# Altium schematic symbol library Transistor.SchLib: 61 symbols (part 1 of 2)
Pins are listed as number, name and electrical type; pins without a type are passive.

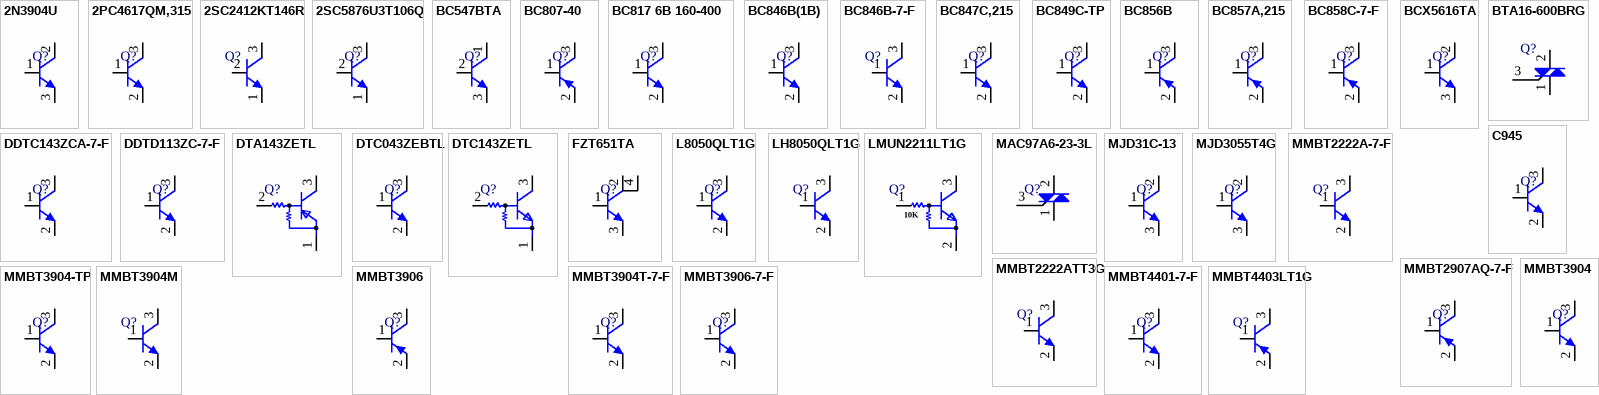
[diagram p0: symbols 2N3904U to MMBT4403LT1G]

## 2N3904U
designator Q?
40V 500mW 100@10mA,1V 200mA NPN SOT-89-3 Bipolar Transistors - BJT ROHS; Manufacturer: CBI; Manufacturer Part Number: 2N3904U; Package: SOT-89-3; LCSC Part Number: C2928256; Item Type: Transistor; ComponentLink1Description: LCSC; ComponentLink1URL: https://www.lcsc.com/product-detail/Bipolar-Transistors-BJT_CBI-2N3904U_C2928256.html
footprint SOT-89-3
pins: 1 B, 2 C, 3 E

## 2PC4617QM,315
designator Q?
TRANS NPN 50V 0.1A SOT-883; Manufacturer: NXP Semiconductors; Manufacturer Part Number: 2PC4617QM,315; Item Type: Transistor; Max Power Dissipation: 250mW; Frequency: 100MHz; hFE Min: 120; Max Collector Current: 200mA; Emitter Base Voltage (VEBO): 5V; Number of Elements: 1; Power Dissipation: 430mW; Supplier: Digikey; LCSC Part Number: C554099; RoHS: Yes; Mounting Technology: Surface Mount; Case/Package: SC; Pins: 3; Min Operating Temperature: -65°C; Max Operating Temperature: 150°C; Package Quantity: 10000; Collector Emitter Voltage (VCEO): 50V; Packaging: Tape and Reel; Polarity: NPN; Collector Base Voltage (VCBO): 50V; Gain Bandwidth Product: 100MHz; Collector-emitter Voltage-Max: 50V; Radiation Hardening: No; Lead Free: Lead Free; RoHS Compliant: Yes; ComponentLink1URL: https://datasheet.ciiva.com/15216/getdatasheetpartid-435560-15216651.pdf?src-supplier=Verical; ComponentLink1Description: https://datasheet.ciiva.com/15216/getdatasheetpartid-435560-15216651.pdf?src-supplier=Verical; ComponentLink2URL: https://datasheet.ciiva.com/979/2pc4617m-series-979622.pdf?src-supplier=Digikey; ComponentLink2Description: https://datasheet.ciiva.com/979/2pc4617m-series-979622.pdf?src-supplier=Digikey
footprint SOT-883-3
pins: 1 B, 2 E, 3 C

## 2SC2412KT146R
designator Q?
TRANS NPN 50V 0.15A SOT-346; Manufacturer: Rohm; Manufacturer Part Number: 2SC2412KT146R; Max Power Dissipation: 200mW; Max Collector Current: 150mA; Collector Base Voltage (VCBO): 60V; hFE Min: 120; Transition Frequency: 180MHz; Emitter Base Voltage (VEBO): 7V; Collector Emitter Saturation Voltage: 400mV; Element Configuration: Single; Item Type: Mosfet; Supplier 1: Digi-Key; Stock 1: 44780; Pricing 1: 1=0.2, 10=0.184, 25=0.1748, 100=0.1, 500=0.06156, 1000=0.04198 (USD); Mount: Surface Mount; Case/Package: SMD/SMT; Number of Pins: 3; Contact Plating: Copper,Tin,Silver; Min Operating Temperature: -55°C; Max Operating Temperature: 150°C; Collector Emitter Voltage (VCEO): 50V; Packaging: Tape and Reel; Package Quantity: 3000; Polarity: NPN; Continuous Collector Current: 150mA; Collector Emitter Breakdown Voltage: 50V; Max Breakdown Voltage: 50V; Gain Bandwidth Product: 180MHz; Max Frequency: 180MHz; Voltage Rating (DC): 50V; Current Rating: 150mA; Length: 2.9mm; Width: 1.6mm; Height: 1.1mm; Radiation Hardening: No; REACH SVHC: No SVHC; Lead Free: Lead Free; RoHS Compliant: Yes; ComponentLink1URL: http://www.farnell.com/datasheets/1918636.pdf?src-supplier=Element14; ComponentLink1Description: http://www.farnell.com/datasheets/1918636.pdf?src-supplier=Element14; ComponentLink2URL: http://www.rohm.com/products/databook/tr/pdf/2sc2412k.pdf?src-supplier=Future+Electronics; ComponentLink2Description: http://www.rohm.com/products/databook/tr/pdf/2sc2412k.pdf?src-supplier=Future+Electronics; ComponentLink3URL: http://www.rohm.com/products/databook/tr/pdf/2sc2412k.pdf?src-supplier=Avnet+Europe; ComponentLink3Description: http://www.rohm.com/products/databook/tr/pdf/2sc2412k.pdf?src-supplier=Avnet+Europe; ComponentLink4URL: https://www.rohm.com/datasheet/2SC2412K/2sc4081u3t106r-e?src-supplier=Digi-Key; ComponentLink4Description: https://www.rohm.com/datasheet/2SC2412K/2sc4081u3t106r-e?src-supplier=Digi-Key; ComponentLink5URL: http://www.mouser.com/ds/2/348/2sc2412k-208972.pdf?src-supplier=Mouser; ComponentLink5Description: http://www.mouser.com/ds/2/348/2sc2412k-208972.pdf?src-supplier=Mouser; Supplier Part Number 1: 2SC2412KT146RCT-ND; LCSC Part Number: C111699
footprint SOT-346
pins: 1 E, 2 B, 3 C

## 2SC5876U3T106Q
designator Q?
TRANS NPN 60V 0.5A UMT3; Manufacturer: Rohm; Manufacturer Part Number: 2SC5876U3T106Q; Item Type: Transistor; Supplier: Newark; LCSC Part Number: C509800; RoHS: No; Pricing: 5=0.458, 10=0.352, 25=0.292, 50=0.245, 100=0.206, 250=0.175, 500=0.144, 1000=0.122 (USD)
footprint UMT3
pins: 1 E, 2 B, 3 C

## BC547BTA
designator Q?
TRANS NPN 45V 0.1A TO92-3; Manufacturer: ON Semiconductor / Fairchild; Manufacturer Part Number: BC547BTA; Item Type: BJTs; Supplier: Future Electronics; Supplier Part Number: 4008015; RoHS: Yes; Stock: 10000; Pricing: 2000=0.041, 8000=0.0391, 20000=0.0379, 50000=0.0368, 80000=0.0351 (USD); Lead Free: 5697LeadFree; ComponentLink1URL: https://datasheet.ciiva.com/5770/bc546-5770589.pdf?src-supplier=Farnell; ComponentLink1Description: https://datasheet.ciiva.com/5770/bc546-5770589.pdf?src-supplier=Farnell; ComponentLink2URL: https://datasheet.ciiva.com/971/bc546-971924.pdf?src-supplier=Digikey; ComponentLink2Description: https://datasheet.ciiva.com/971/bc546-971924.pdf?src-supplier=Digikey; ComponentLink3URL: https://datasheet.ciiva.com/971/bc546-971925.pdf?src-supplier=Digikey; ComponentLink3Description: https://datasheet.ciiva.com/971/bc546-971925.pdf?src-supplier=Digikey; ComponentLink4URL: https://datasheet.ciiva.com/11197/bc550-11197771.pdf?src-supplier=Avnet; ComponentLink4Description: https://datasheet.ciiva.com/11197/bc550-11197771.pdf?src-supplier=Avnet; ComponentLink5URL: https://datasheet.ciiva.com/4722/bc547-4722169.pdf?src-supplier=Mouser; ComponentLink5Description: https://datasheet.ciiva.com/4722/bc547-4722169.pdf?src-supplier=Mouser; ComponentLink6URL: https://datasheet.ciiva.com/1195/1868820-1195467.pdf?src-supplier=Element14; ComponentLink6Description: https://datasheet.ciiva.com/1195/1868820-1195467.pdf?src-supplier=Element14; ComponentLink7URL: https://datasheet.ciiva.com/1195/1868820-1195468.pdf?src-supplier=Element14; ComponentLink7Description: https://datasheet.ciiva.com/1195/1868820-1195468.pdf?src-supplier=Element14; ComponentLink8URL: https://datasheet.ciiva.com/17179/bc546-17179703.pdf?src-supplier=Future+Electronics; ComponentLink8Description: https://datasheet.ciiva.com/17179/bc546-17179703.pdf?src-supplier=Future+Electronics; LCSC Part Number: C258144
footprint TO-92-3L
pins: 1 C, 2 B, 3 E

## BC807-40
designator Q?
45V 310mW 250@100mA,1V 800mA SOT-23 Bipolar (BJT) ROHS; Manufacturer: KEXIN; Manufacturer Part Number: BC807-40; Item Type: (BJT); Package: SOT-23; LCSC Part Number: C489159; ComponentLink1Description: LCSC; ComponentLink1URL: https://www.lcsc.com/product-detail/Bipolar-BJT_KEXIN-BC807-40_C489159.html
footprint SOT-23 (TRANS NPN 40V 0.6A SOT23)
pins: 1 B, 2 E, 3 C

## BC817 6B 160-400
designator Q?
45V 300mW 100@100mA,1V 500mA NPN SOT-23 Bipolar Transistors - BJT ROHS; Manufacturer: DOWO; Manufacturer Part Number: BC817 6B 160-400; Package: SOT-23; LCSC Part Number: C371086; Item Type: Transistor; ComponentLink1Description: LCSC; ComponentLink1URL: https://www.lcsc.com/product-detail/Bipolar-Transistors-BJT_DOWO-BC817-6B-160-400_C371086.html
footprint SOT-23 (TRANS NPN 40V 0.6A SOT23)
pins: 1 B, 2 E, 3 C

## BC846B(1B)
designator Q?
65V 300mW 200@2mA,5V 100mA NPN SOT-23 Bipolar Transistors - BJT ROHS; Manufacturer: ST(Semtech); Manufacturer Part Number: BC846B(1B); Package: SOT-23; LCSC Part Number: C118727; Item Type: Transistor; ComponentLink1Description: LCSC; ComponentLink1URL: https://www.lcsc.com/product-detail/Transistors-NPN-PNP_ST-Semtech-BC846B-1B_C118727.html
footprint SOT-23 (TRANS NPN 40V 0.6A SOT23)
pins: 1 B, 2 E, 3 C

## BC846B-7-F
designator Q?
TRANS NPN 65V 0.1A SOT23-3; Manufacturer: Diodes; Manufacturer Part Number: BC846B-7-F; Item Type: Transistors; Supplier: Future Electronics; Supplier Part Number: 3888237; RoHS: Yes; Category: BJTs; Stock: 4416000; Pricing: 3000=0.0363, 12000=0.0348, 45000=0.0335, 120000=0.0325, 300000=0.0309 (USD); ComponentLink1URL: https://datasheet.ciiva.com/15139/getdatasheetpartid-139519-15139459.pdf?src-supplier=Verical; ComponentLink1Description: https://datasheet.ciiva.com/15139/getdatasheetpartid-139519-15139459.pdf?src-supplier=Verical; ComponentLink2URL: https://datasheet.ciiva.com/22711/1911717-22711685.pdf?src-supplier=Element14; ComponentLink2Description: https://datasheet.ciiva.com/22711/1911717-22711685.pdf?src-supplier=Element14; LCSC Part Number: C183643
footprint SOT-23 (TRANS NPN 40V 0.6A SOT23)
pins: 1 B, 2 E, 3 C

## BC847C,215
designator Q?
TRANS NPN 45V 0.1A TO-236AB; Manufacturer: Nexperia; Manufacturer Part Number: BC847C,215; Item Type: BJTs; Polarity: 5054Direction; Supplier: Future Electronics; LCSC Part Number: C8664; RoHS: Yes; Stock: 18000; Pricing: 3000=0.0084, 12000=0.0081, 30000=0.0079, 75000=0.0077, 120000=0.0074 (USD); Pins: 3NUMBER; Packaging: 13Packaging; RoHS Compliant: Yes; ComponentLink1URL: http://www.farnell.com/datasheets/1856333.pdf?src-supplier=Farnell; ComponentLink1Description: http://www.farnell.com/datasheets/1856333.pdf?src-supplier=Farnell; ComponentLink2URL: https://assets.nexperia.com/documents/data-sheet/BC847_SER.pdf?src-supplier=Digikey; ComponentLink2Description: https://assets.nexperia.com/documents/data-sheet/BC847_SER.pdf?src-supplier=Digikey; ComponentLink3URL: https://datasheet.octopart.com/BC847C%2C215-NXP-Semiconductors-datasheet-20734447.pdf?src-supplier=Farnell; ComponentLink3Description: https://datasheet.octopart.com/BC847C%2C215-NXP-Semiconductors-datasheet-20734447.pdf?src-supplier=Farnell; ComponentLink4URL: https://datasheet.octopart.com/BC847C%2C215-Nexperia-datasheet-164345412.pdf?src-supplier=Future+Electronics; ComponentLink4Description: https://datasheet.octopart.com/BC847C%2C215-Nexperia-datasheet-164345412.pdf?src-supplier=Future+Electronics; ComponentLink5URL: https://datasheet.octopart.com/BC847C%2C215-Nexperia-datasheet-11982477.pdf?src-supplier=Newark; ComponentLink5Description: https://datasheet.octopart.com/BC847C%2C215-Nexperia-datasheet-11982477.pdf?src-supplier=Newark; ComponentLink6URL: https://datasheet.octopart.com/BC847C%2C215-Nexperia-datasheet-5341283.pdf?src-supplier=TME; ComponentLink6Description: https://datasheet.octopart.com/BC847C%2C215-Nexperia-datasheet-5341283.pdf?src-supplier=TME
footprint SOT-23 (TRANS NPN 40V 0.6A SOT23)
pins: 1 B, 2 E, 3 C

## BC849C-TP
designator Q?
TRANS NPN 30V 0.1A SOT23; Manufacturer: MCC; Manufacturer Part Number: BC849C-TP; Frequency: 100MHz; Max Power Dissipation: 225mW; Max Collector Current: 100mA; Emitter Base Voltage (VEBO): 6V; Number of Elements: 1; Collector-emitter Voltage-Max: 500mV; Item Type: Transistor; Supplier: Arrow Electronics; Supplier Part Number: BC849C-TP; RoHS: Yes; Category: BJTs; Stock: 3000; Pricing: 3000=0.0323, 9000=0.0245, 24000=0.0235, 45000=0.0216, 99000=0.0186 (USD); Mounting Technology: Surface Mount; Case/Package: SOT-23; Pins: 3; Min Operating Temperature: -55°C; Max Operating Temperature: 150°C; Package Quantity: 1; Collector Emitter Voltage (VCEO): 30V; Packaging: Tape and Reel; Transition Frequency: 100MHz; Collector Emitter Breakdown Voltage: 30V; Max Breakdown Voltage: 30V; Polarity: NPN; Collector Base Voltage (VCBO): 30V; Power Dissipation: 225mW; Gain Bandwidth Product: 100MHz; Series: BC849; Radiation Hardening: No; Lead Free: Lead Free; RoHS Compliant: Yes; Reach SVHC Compliant: Unknown; ComponentLink1URL: https://datasheet.ciiva.com/6362/bc846a-bc849csot-23-6362344.pdf?src-supplier=Digikey; ComponentLink1Description: https://datasheet.ciiva.com/6362/bc846a-bc849csot-23-6362344.pdf?src-supplier=Digikey; ComponentLink2URL: https://datasheet.ciiva.com/6362/bc846a-bc849csot-23-6362345.pdf?src-supplier=Digikey; ComponentLink2Description: https://datasheet.ciiva.com/6362/bc846a-bc849csot-23-6362345.pdf?src-supplier=Digikey; ComponentLink3URL: https://datasheet.ciiva.com/6362/bc846a-bc849csot-23-6362342.pdf?src-supplier=Digikey; ComponentLink3Description: https://datasheet.ciiva.com/6362/bc846a-bc849csot-23-6362342.pdf?src-supplier=Digikey; ComponentLink4URL: https://datasheet.ciiva.com/15200/getdatasheetpartid-334290-15200455.pdf?src-supplier=Verical; ComponentLink4Description: https://datasheet.ciiva.com/15200/getdatasheetpartid-334290-15200455.pdf?src-supplier=Verical
footprint SOT-23 (TRANS NPN 40V 0.6A SOT23)
pins: 1 B, 2 E, 3 C

## BC856B
designator Q?
65V 200mW 220@2mA,5V 100mA PNP SOT-23 Bipolar Transistors - BJT ROHS; Manufacturer: Guangdong Hottech; Manufacturer Part Number: BC856B; Package: SOT-23; LCSC Part Number: C181144; Item Type: Transistors; ComponentLink1Description: LCSC; ComponentLink1URL: https://www.lcsc.com/product-detail/Bipolar-Transistors-BJT_Guangdong-Hottech-BC856B_C181144.html
footprint SOT-23 (TRANS NPN 40V 0.6A SOT23)
pins: 1 B, 2 E, 3 C

## BC857A,215
designator Q?
TRANS PNP 45V 0.1A TO-236AB; Manufacturer: Nexperia; Manufacturer Part Number: BC857A,215; Item Type: Mosfet; Polarity: 5055Direction; Supplier: Rs; LCSC Part Number: C201757; RoHS: Yes; Stock: 19990; Pins: 3NUMBER; RoHS Compliant: 5897YesNo; ComponentLink1URL: https://assets.nexperia.com/documents/data-sheet/BC856_BC857_BC858.pdf?src-supplier=Digikey; ComponentLink1Description: https://assets.nexperia.com/documents/data-sheet/BC856_BC857_BC858.pdf?src-supplier=Digikey; ComponentLink2URL: https://datasheet.octopart.com/BC857A%2C215-Nexperia-datasheet-8507722.pdf?src-supplier=Newark; ComponentLink2Description: https://datasheet.octopart.com/BC857A%2C215-Nexperia-datasheet-8507722.pdf?src-supplier=Newark; ComponentLink3URL: https://datasheet.octopart.com/BC857A%2C215-Nexperia-datasheet-87580908.pdf?src-supplier=LKR; ComponentLink3Description: https://datasheet.octopart.com/BC857A%2C215-Nexperia-datasheet-87580908.pdf?src-supplier=LKR
footprint SOT-23 (TRANS NPN 40V 0.6A SOT23)
pins: 1 B, 2 E, 3 C

## BC858C-7-F
designator Q?
TRANS PNP 30V 0.1A SOT23-3; Manufacturer: Diodes; Manufacturer Part Number: BC858C-7-F; Item Type: BJTs; Supplier: Future Electronics; LCSC Part Number: C526469; RoHS: Yes; Stock: 69000; Pricing: 3000=0.021, 12000=0.0201, 30000=0.0195, 75000=0.0189, 120000=0.0181 (USD); ComponentLink1URL: https://datasheet.ciiva.com/22711/1911718-22711708.pdf?src-supplier=Element14; ComponentLink1Description: https://datasheet.ciiva.com/22711/1911718-22711708.pdf?src-supplier=Element14; ComponentLink2URL: https://datasheet.ciiva.com/11206/ds11207-11206007.pdf?src-supplier=Avnet; ComponentLink2Description: https://datasheet.ciiva.com/11206/ds11207-11206007.pdf?src-supplier=Avnet
footprint SOT-23 (TRANS NPN 40V 0.6A SOT23)
pins: 1 B, 2 E, 3 C

## BCX5616TA
designator Q?
TRANS NPN 80V 1A SOT89-3; Manufacturer: Diodes; Manufacturer Part Number: BCX5616TA; Item Type: Transistor; Supplier: Future Electronics; Supplier Part Number: 8266140; RoHS: Yes; Category: BJTs; Stock: 564000; Pricing: 1000=0.0584, 4000=0.0557, 15000=0.0532, 25000=0.0523, 30000=0.0434, 50000=0.0494, 75000=0.0411 (USD); ComponentLink1URL: http://www.farnell.com/datasheets/2238091.pdf?src-supplier=Farnell; ComponentLink1Description: http://www.farnell.com/datasheets/2238091.pdf?src-supplier=Farnell; ComponentLink2URL: https://datasheet.octopart.com/BCX5616TA-Zetex-datasheet-93265.pdf?src-supplier=Digi-Key; ComponentLink2Description: https://datasheet.octopart.com/BCX5616TA-Zetex-datasheet-93265.pdf?src-supplier=Digi-Key; ComponentLink3URL: https://datasheet.octopart.com/BCX5616TA-Diodes-Inc.-datasheet-62305054.pdf?src-supplier=Future+Electronics; ComponentLink3Description: https://datasheet.octopart.com/BCX5616TA-Diodes-Inc.-datasheet-62305054.pdf?src-supplier=Future+Electronics; ComponentLink4URL: https://datasheet.octopart.com/BCX5616TA-Diodes-Inc.-datasheet-79809.pdf?src-supplier=Newark; ComponentLink4Description: https://datasheet.octopart.com/BCX5616TA-Diodes-Inc.-datasheet-79809.pdf?src-supplier=Newark; LCSC Part Number: C435873
footprint SOT-89-3
pins: 1 B, 2 C, 3 E

## BTA16-600BRG
designator Q?
TRIAC Standard 600V 16A Through Hole TO-220AB; Manufacturer: STMicroelectronics; Manufacturer Part Number: BTA16-600BRG; Supplier: Mouser; Supplier Part Number: 511-BTA16-600B; RoHS: Yes; Category: TRIACs; Stock: 13093; Pricing: 1=2.4, 10=2.14, 50=2.14, 100=1.74, 1000=1.2, 10000=1.11 (USD); ComponentLink1URL: https://datasheet.ciiva.com/15140/getdatasheetpartid-185587-15140605.pdf?src-supplier=Verical; ComponentLink1Description: https://datasheet.ciiva.com/15140/getdatasheetpartid-185587-15140605.pdf?src-supplier=Verical; ComponentLink2URL: https://datasheet.ciiva.com/3054/cd00002265-3054339.pdf?src-supplier=Avnet; ComponentLink2Description: https://datasheet.ciiva.com/3054/cd00002265-3054339.pdf?src-supplier=Avnet; ComponentLink3URL: https://datasheet.ciiva.com/16397/cd00002265-16397087.pdf?src-supplier=Future+Electronics; ComponentLink3Description: https://datasheet.ciiva.com/16397/cd00002265-16397087.pdf?src-supplier=Future+Electronics; ComponentLink4URL: https://datasheet.ciiva.com/1218/1699992-1218264.pdf?src-supplier=Farnell; ComponentLink4Description: https://datasheet.ciiva.com/1218/1699992-1218264.pdf?src-supplier=Farnell; ComponentLink5URL: https://datasheet.ciiva.com/14164/tfstm-triacs-bta-btb-16-xxx-en-14164139.pdf?src-supplier=Distrelec; ComponentLink5Description: https://datasheet.ciiva.com/14164/tfstm-triacs-bta-btb-16-xxx-en-14164139.pdf?src-supplier=Distrelec; ComponentLink6URL: https://datasheet.ciiva.com/4748/cd00002265-4748742.pdf?src-supplier=Mouser; ComponentLink6Description: https://datasheet.ciiva.com/4748/cd00002265-4748742.pdf?src-supplier=Mouser; ComponentLink7URL: https://datasheet.ciiva.com/1197/1699992-1197134.pdf?src-supplier=Element14; ComponentLink7Description: https://datasheet.ciiva.com/1197/1699992-1197134.pdf?src-supplier=Element14; ComponentLink8URL: https://datasheet.ciiva.com/1198/1699992-1198139.pdf?src-supplier=Element14; ComponentLink8Description: https://datasheet.ciiva.com/1198/1699992-1198139.pdf?src-supplier=Element14; Item Type: TRIAC
footprint TO-220
pins: 1 A1, 2 A2, 3 G

## C945
designator Q?
50V 200mW 130@1mA,6V 100mA NPN SOT-23 Bipolar (BJT) ROHS; Manufacturer: BORN; Manufacturer Part Number: C945; Package: SOT-23; LCSC Part Number: C7461211; Item Type: BJT; ComponentLink1Description: LCSC; ComponentLink1URL: https://www.lcsc.com/product-detail/Bipolar-BJT_BORN-C945_C7461211.html?s_z=n_c945
footprint SOT-23 (TRANS NPN 40V 0.6A SOT23)
pins: 1 B, 2 E, 3 C

## DDTC143ZCA-7-F
designator Q?
TRANS PREBIAS NPN 50V SOT23-3; Manufacturer: Diodes; Manufacturer Part Number: DDTC143ZCA-7-F; Item Type: BJTs; Supplier: Rs; LCSC Part Number: C508183; RoHS: Yes; Stock: 6400; Pricing: 1000=0.669, 2000=0.635, 3000=0.445, 6000=0.424 (DKK); ComponentLink1URL: http://uk.rs-online.com/webdocs/1321/0900766b81321d3c.pdf?src-supplier=Rs; ComponentLink1Description: http://uk.rs-online.com/webdocs/1321/0900766b81321d3c.pdf?src-supplier=Rs; ComponentLink2URL: http://components.arrow.com/part/dataview/41508542S9348013N2867?src-supplier=Arrow+Electronics; ComponentLink2Description: http://components.arrow.com/part/dataview/41508542S9348013N2867?src-supplier=Arrow+Electronics; ComponentLink3URL: http://www.mouser.com/ds/2/115/ds30330-71322.pdf?src-supplier=Mouser; ComponentLink3Description: http://www.mouser.com/ds/2/115/ds30330-71322.pdf?src-supplier=Mouser; ComponentLink4URL: http://www.alliedelec.com/m/d/be0b5f6f3c5081911d08f51c92d34358.pdf?src-supplier=Allied+Electronics; ComponentLink4Description: http://www.alliedelec.com/m/d/be0b5f6f3c5081911d08f51c92d34358.pdf?src-supplier=Allied+Electronics; ComponentLink5URL: https://www.diodes.com/assets/Datasheets/ds30330.pdf?src-supplier=Digikey; ComponentLink5Description: https://www.diodes.com/assets/Datasheets/ds30330.pdf?src-supplier=Digikey; ComponentLink6URL: https://datasheet.octopart.com/DDTC143ZCA-7-F-Diodes-Inc.-datasheet-46751235.pdf?src-supplier=Farnell; ComponentLink6Description: https://datasheet.octopart.com/DDTC143ZCA-7-F-Diodes-Inc.-datasheet-46751235.pdf?src-supplier=Farnell; ComponentLink7URL: http://www.diodes.com//datasheets/ds30330.pdf?src-supplier=Avnet; ComponentLink7Description: http://www.diodes.com//datasheets/ds30330.pdf?src-supplier=Avnet; ComponentLink8URL: http://www.diodes.com/_files/datasheets/ds30330.pdf?src-supplier=Future+Electronics; ComponentLink8Description: http://www.diodes.com/_files/datasheets/ds30330.pdf?src-supplier=Future+Electronics
footprint SOT-23 (TRANS NPN 40V 0.6A SOT23)
pins: 1 B, 2 E, 3 C

## DDTD113ZC-7-F
designator Q?
TRANS PREBIAS NPN 50V SOT23-3; Manufacturer: Diodes Zetex; Manufacturer Part Number: DDTD113ZC-7-F; Item Type: BJTs; Supplier: Digikey; Supplier Part Number: DDTD113ZC-7FDICT-ND; RoHS: Yes; Stock: 793860; Pricing: 1=0.31, 10=0.21, 100=0.1027, 500=0.08562, 1000=0.05949 (USD); ComponentLink1URL: https://datasheet.ciiva.com/15139/getdatasheetpartid-323116-15139824.pdf?src-supplier=Verical; ComponentLink1Description: https://datasheet.ciiva.com/15139/getdatasheetpartid-323116-15139824.pdf?src-supplier=Verical
footprint SOT-23 (TRANS NPN 40V 0.6A SOT23)
pins: 1 B, 2 E, 3 C

## DTA143ZETL
designator Q?
TRANS PREBIAS PNP 50V 0.1A EMT3; Manufacturer: Rohm; Manufacturer Part Number: DTA143ZETL; Item Type: Mosfet; Supplier: Mouser; LCSC Part Number: C600679; RoHS: Yes; Stock: 24993; Pricing: 1=0.24, 10=0.145, 50=0.145, 100=0.064, 1000=0.064, 10000=0.04 (USD); ComponentLink1URL: https://datasheet.ciiva.com/988/dtc143z-988064.pdf?src-supplier=Digikey; ComponentLink1Description: https://datasheet.ciiva.com/988/dtc143z-988064.pdf?src-supplier=Digikey; ComponentLink2URL: https://datasheet.ciiva.com/5781/dtc143ze-5781998.pdf?src-supplier=Farnell; ComponentLink2Description: https://datasheet.ciiva.com/5781/dtc143ze-5781998.pdf?src-supplier=Farnell; ComponentLink3URL: https://datasheet.ciiva.com/988/dtc143z-988062.pdf?src-supplier=Digikey; ComponentLink3Description: https://datasheet.ciiva.com/988/dtc143z-988062.pdf?src-supplier=Digikey; ComponentLink4URL: https://datasheet.ciiva.com/988/dtc143z-988063.pdf?src-supplier=Digikey; ComponentLink4Description: https://datasheet.ciiva.com/988/dtc143z-988063.pdf?src-supplier=Digikey
footprint SOT-416
pins: 1 E, 2 B, 3 C

## DTC043ZEBTL
designator Q?
TRANS PREBIAS NPN 50V EMT3F; Manufacturer: Rohm; Manufacturer Part Number: DTC043ZEBTL; Element Configuration: Single; Max Collector Current: 100mA; Collector Emitter Voltage (VCEO): 150mV; Transition Frequency: 250MHz; Max Power Dissipation: 150mW; Output Voltage: 50mV; Supplier 1: Digi-Key; Stock 1: 1909; Pricing 1: 1=0.17, 10=0.153, 25=0.1456, 100=0.0834, 500=0.0513, 1000=0.03498 (USD); Mount: Surface Mount; Number of Pins: 3; Min Operating Temperature: -55°C; Max Operating Temperature: 150°C; Packaging: Tape and Reel; Collector Emitter Breakdown Voltage: 50V; Max Breakdown Voltage: 50V; Polarity: NPN; Max Frequency: 250MHz; Continuous Collector Current: 100mA; Package Quantity: 3000; Series: -; Collector-emitter Voltage-Max: 150mV; Radiation Hardening: No; Lead Free: Lead Free; RoHS Compliant: Yes; ComponentLink1URL: http://www.farnell.com/datasheets/2644341.pdf?src-supplier=Newark; ComponentLink1Description: http://www.farnell.com/datasheets/2644341.pdf?src-supplier=Newark; ComponentLink2URL: http://www.mouser.com/ds/2/348/tc043zebtl-e-1019210.pdf?src-supplier=Mouser; ComponentLink2Description: http://www.mouser.com/ds/2/348/tc043zebtl-e-1019210.pdf?src-supplier=Mouser; ComponentLink3URL: http://avnetexpress.avnet.com/store/em/EMController/Digital-BJT/Rohm-Semiconductor/DTC043ZEBTL/_/R-16023578/A-16023578/rohmfs.rohm.com/en/products/databook/datasheet/discrete/transistor/digital/dtc043zeb.pdf?src-supplier=Avnet; ComponentLink3Description: http://avnetexpress.avnet.com/store/em/EMController/Digital-BJT/Rohm-Semiconductor/DTC043ZEBTL/_/R-16023578/A-16023578/rohmfs.rohm.com/en/products/databook/datasheet/discrete/transistor/digital/dtc043zeb.pdf?src-supplier=Avnet; ComponentLink4URL: http://rohmfs.rohm.com/en/products/databook/datasheet/discrete/transistor/digital/dtc043zeb.pdf?src-supplier=Avnet+Asia; ComponentLink4Description: http://rohmfs.rohm.com/en/products/databook/datasheet/discrete/transistor/digital/dtc043zeb.pdf?src-supplier=Avnet+Asia; ComponentLink5URL: http://rohmfs.rohm.com/en/products/databook/datasheet/discrete/transistor/digital/dtc043zmt2l-e.pdf?src-supplier=Digi-Key; ComponentLink5Description: http://rohmfs.rohm.com/en/products/databook/datasheet/discrete/transistor/digital/dtc043zmt2l-e.pdf?src-supplier=Digi-Key; ComponentLink6URL: http://rohmfs.rohm.com/en/techdata_basic/transistor/taping/EMT3_TL_taping.pdf?src-supplier=Digi-Key; ComponentLink6Description: http://rohmfs.rohm.com/en/techdata_basic/transistor/taping/EMT3_TL_taping.pdf?src-supplier=Digi-Key; Supplier Part Number 1: DTC043ZEBTLCT-ND; LCSC Part Number: C96459
footprint SOT-416FL
pins: 1 B, 2 E, 3 C

## DTC143ZETL
designator Q?
TRANS PREBIAS NPN 50V 0.1A EMT3; Manufacturer: Rohm; Manufacturer Part Number: DTC143ZETL; Item Type: Mosfet; Supplier: Mouser; LCSC Part Number: C111728; RoHS: Yes; Stock: 24993; Pricing: 1=0.24, 10=0.145, 50=0.145, 100=0.064, 1000=0.064, 10000=0.04 (USD); ComponentLink1URL: https://datasheet.ciiva.com/988/dtc143z-988064.pdf?src-supplier=Digikey; ComponentLink1Description: https://datasheet.ciiva.com/988/dtc143z-988064.pdf?src-supplier=Digikey; ComponentLink2URL: https://datasheet.ciiva.com/5781/dtc143ze-5781998.pdf?src-supplier=Farnell; ComponentLink2Description: https://datasheet.ciiva.com/5781/dtc143ze-5781998.pdf?src-supplier=Farnell; ComponentLink3URL: https://datasheet.ciiva.com/988/dtc143z-988062.pdf?src-supplier=Digikey; ComponentLink3Description: https://datasheet.ciiva.com/988/dtc143z-988062.pdf?src-supplier=Digikey; ComponentLink4URL: https://datasheet.ciiva.com/988/dtc143z-988063.pdf?src-supplier=Digikey; ComponentLink4Description: https://datasheet.ciiva.com/988/dtc143z-988063.pdf?src-supplier=Digikey
footprint SOT-416
pins: 1 E, 2 B, 3 C

## FZT651TA
designator Q?
TRANS NPN 60V 3A SOT223-3; Manufacturer: Diodes Zetex; Manufacturer Part Number: FZT651TA; Item Type: BJTs; Max Power Dissipation: 2W; Number of Elements: 1; Frequency: 175MHz; hFE Min: 100; Collector Base Voltage (VCBO): 80V; Emitter Base Voltage (VEBO): 5V; Collector Emitter Saturation Voltage: 430mV; Collector-emitter Voltage-Max: 600mV; Supplier: Future Electronics; LCSC Part Number: C24098; RoHS: Yes; Stock: 670000; Pricing: 1000=0.265, 3000=0.255, 4000=0.25, 10000=0.245, 15000=0.24 (USD); Mounting Technology: Surface Mount; Case/Package: SOT-223; Pins: 4; Weight: 0.000282oz; Min Operating Temperature: -55°C; Max Operating Temperature: 150°C; Packaging: Tape and Reel; Package Quantity: 1; Collector Emitter Voltage (VCEO): 60V; Max Collector Current: 3A; Transition Frequency: 175MHz; Polarity: NPN; Continuous Collector Current: 3A; Collector Emitter Breakdown Voltage: 60V; Max Breakdown Voltage: 60V; Clock Frequency: 175MHz; Power Dissipation: 2W; Termination: SMD/SMT; Gain Bandwidth Product: 175MHz; Voltage Rating (DC): 60V; Current Rating: 3A; Current: 3A; Voltage: 60V; Series: -; Length: 6.7mm; Width: 3.7mm; Height: 1.65mm; Radiation Hardening: No; Reach SVHC Compliant: No; Lead Free: Lead Free; RoHS Compliant: Yes; ComponentLink1URL: https://datasheet.ciiva.com/5782/73067-5782650.pdf?src-supplier=Farnell; ComponentLink1Description: https://datasheet.ciiva.com/5782/73067-5782650.pdf?src-supplier=Farnell; ComponentLink2URL: https://datasheet.ciiva.com/8029/73067-8029643.pdf?src-supplier=Element14; ComponentLink2Description: https://datasheet.ciiva.com/8029/73067-8029643.pdf?src-supplier=Element14; ComponentLink3URL: https://datasheet.ciiva.com/4723/fzt651-4723319.pdf?src-supplier=Mouser; ComponentLink3Description: https://datasheet.ciiva.com/4723/fzt651-4723319.pdf?src-supplier=Mouser; ComponentLink4URL: https://datasheet.ciiva.com/975/fzt651-975544.pdf?src-supplier=Digikey; ComponentLink4Description: https://datasheet.ciiva.com/975/fzt651-975544.pdf?src-supplier=Digikey
footprint SOT- 223
pins: 1 B, 2 C, 3 E, 4 C

## L8050QLT1G
designator Q?
25V 225mW 800mA NPN SOT-23 Bipolar Transistors - BJT ROHS; Manufacturer: LRC; Manufacturer Part Number: L8050QLT1G; Item Type: Mosfet; Package: SOT-23; LCSC Part Number: C49581; ComponentLink1Description: LCSC; ComponentLink1URL: https://www.lcsc.com/product-detail/Bipolar-Transistors-BJT_LRC-L8050QLT1G_C49581.html
footprint SOT-23 (TRANS NPN 40V 0.6A SOT23)
pins: 1 B, 2 E, 3 C

## LH8050QLT1G
designator Q?
100nA 50V 225mW 1.5A 500mV@800mA,80mA NPN -55℃~+150℃@(Tj) SOT-23(SOT-23-3) Bipolar Transistors - BJT ROHS; Manufacturer: LRC; Manufacturer Part Number: LH8050QLT1G; Package: SOT-23(SOT-23-3); ComponentLink1Description: LCSC; ComponentLink1URL: https://www.lcsc.com/product-detail/Bipolar-Transistors-BJT_LRC-LH8050QLT1G_C132810.html; LCSC Part Number: C132810
footprint SOT-23-3L_
pins: 1 B, 2 E, 3 C

## LMUN2211LT1G
designator Q?
NPN 246mW 100mA 50V SOT-23 Digital Transistors ROHS; Manufacturer: LRC; Manufacturer Part Number: LMUN2211LT1G; Item Type: Mosfet; Package: SOT-23; LCSC Part Number: C12775; ComponentLink1Description: LCSC; ComponentLink1URL: https://www.lcsc.com/product-detail/Digital-Transistors_LRC-LMUN2211LT1G_C12775.html
footprint SOT-23 (TRANS NPN 40V 0.6A SOT23)
pins: 1 B, 2 E, 3 C
text: 10K

## MAC97A6-23-3L
designator Q?
10mA 600V 1 TRIAC SOT-23-3L Thyristors (SCR)/Modules ROHS; Manufacturer: KY; Manufacturer Part Number: MAC97A6-23-3L; LCSC Part Number: C2831928; Item Type: Triac
footprint SOT-23 (TRANS NPN 40V 0.6A SOT23)
pins: 1 T1, 2 T2, 3 G

## MJD31C-13
designator Q?
TRANS NPN 100V 3A TO252; Manufacturer: Diodes Zetex; Manufacturer Part Number: MJD31C-13; Item Type: Mosfet; Supplier: Future Electronics; LCSC Part Number: C435909; RoHS: Yes; Stock: 2875000; Pricing: 2500=0.113, 5000=0.111, 7500=0.11, 10000=0.109, 12500=0.106 (USD); ComponentLink1URL: https://datasheet.ciiva.com/6360/ds31625-6360177.pdf?src-supplier=Digikey; ComponentLink1Description: https://datasheet.ciiva.com/6360/ds31625-6360177.pdf?src-supplier=Digikey; ComponentLink2URL: https://datasheet.ciiva.com/16462/ds31625-16462219.pdf?src-supplier=Future+Electronics; ComponentLink2Description: https://datasheet.ciiva.com/16462/ds31625-16462219.pdf?src-supplier=Future+Electronics; ComponentLink3URL: https://datasheet.ciiva.com/16285/ds31625-16285775.pdf?src-supplier=Mouser; ComponentLink3Description: https://datasheet.ciiva.com/16285/ds31625-16285775.pdf?src-supplier=Mouser
footprint DPAK
pins: 1 B, 2 C, 3 E

## MJD3055T4G
designator Q?
TRANS NPN 60V 10A DPAK; Manufacturer: ON Semiconductor; Manufacturer Part Number: MJD3055T4G; Item Type: Mosfet; Supplier: Future Electronics; LCSC Part Number: C150250; RoHS: Yes; Stock: 2500; Pricing: 2500=0.27, 5000=0.265, 7500=0.26 (USD); ComponentLink1URL: https://datasheet.ciiva.com/7972/79237-7972276.pdf?src-supplier=Element14; ComponentLink1Description: https://datasheet.ciiva.com/7972/79237-7972276.pdf?src-supplier=Element14; ComponentLink2URL: https://datasheet.ciiva.com/15139/getdatasheetpartid-91662-15139167.pdf?src-supplier=Verical; ComponentLink2Description: https://datasheet.ciiva.com/15139/getdatasheetpartid-91662-15139167.pdf?src-supplier=Verical; ComponentLink3URL: https://datasheet.ciiva.com/16462/mjd2955-d-16462217.pdf?src-supplier=Future+Electronics; ComponentLink3Description: https://datasheet.ciiva.com/16462/mjd2955-d-16462217.pdf?src-supplier=Future+Electronics; ComponentLink4URL: https://datasheet.ciiva.com/6357/mjd2955-d-6357033.pdf?src-supplier=Digikey; ComponentLink4Description: https://datasheet.ciiva.com/6357/mjd2955-d-6357033.pdf?src-supplier=Digikey; ComponentLink5URL: https://datasheet.ciiva.com/981/mjd2955-d-981380.pdf?src-supplier=Digikey; ComponentLink5Description: https://datasheet.ciiva.com/981/mjd2955-d-981380.pdf?src-supplier=Digikey; ComponentLink6URL: https://datasheet.ciiva.com/981/mjd2955-d-981381.pdf?src-supplier=Digikey; ComponentLink6Description: https://datasheet.ciiva.com/981/mjd2955-d-981381.pdf?src-supplier=Digikey; ComponentLink7URL: https://datasheet.ciiva.com/11198/mjd2955-d-11198541.pdf?src-supplier=Avnet; ComponentLink7Description: https://datasheet.ciiva.com/11198/mjd2955-d-11198541.pdf?src-supplier=Avnet; ComponentLink8URL: https://datasheet.ciiva.com/11205/mjd2955-d-11205173.pdf?src-supplier=Avnet; ComponentLink8Description: https://datasheet.ciiva.com/11205/mjd2955-d-11205173.pdf?src-supplier=Avnet
footprint DPAK
pins: 1 B, 2 C, 3 E

## MMBT2222A-7-F
designator Q?
TRANS NPN 40V 0.6A SMD SOT23-3; Manufacturer: Diodes; Manufacturer Part Number: MMBT2222A-7-F; Max Power Dissipation: 300mW; Collector Base Voltage (VCBO): 75V; Max Collector Current: 600mA; hFE Min: 100; Frequency: 300MHz; Number of Elements: 1; Emitter Base Voltage (VEBO): 6V; Collector Emitter Saturation Voltage: 1V; Power Dissipation: 350mW; Element Configuration: Single; Current: 1A; Item Type: Mosfet; Supplier 1: Digi-Key; Stock 1: 2471182; Pricing 1: 1=0.15, 10=0.134, 100=0.0729, 500=0.04486, 1000=0.03059 (USD); Mount: Surface Mount; Case/Package: SOT-23; Number of Pins: 3; Weight: 0.000282oz; Contact Plating: Matte,Tin; Min Operating Temperature: -55°C; Max Operating Temperature: 150°C; Packaging: Tape and Reel; Collector Emitter Voltage (VCEO): 40V; Polarity: NPN; Voltage Rating (DC): 40V; Package Quantity: 3000; Continuous Collector Current: 600mA; Collector Emitter Breakdown Voltage: 40V; Transition Frequency: 300MHz; Max Breakdown Voltage: 40V; Max Frequency: 300MHz; Termination: SMD/SMT; Gain Bandwidth Product: 300MHz; Current Rating: 600mA; Voltage: 40V; Length: 3.05mm; Height: 1mm; Width: 1.4mm; Radiation Hardening: No; Lead Free: Lead Free; REACH SVHC: No SVHC; ComponentLink1URL: http://www.diodes.com/datasheets/ds30041.pdf?src-supplier=Future+Electronics; ComponentLink1Description: http://www.diodes.com/datasheets/ds30041.pdf?src-supplier=Future+Electronics; ComponentLink2URL: http://www.diodes.com/datasheets/ds30041.pdf?src-supplier=Avnet; ComponentLink2Description: http://www.diodes.com/datasheets/ds30041.pdf?src-supplier=Avnet; ComponentLink3URL: https://www.verical.com/server-webapp/html/getDatasheet?partID=82692&src-supplier=Verical; ComponentLink3Description: https://www.verical.com/server-webapp/html/getDatasheet?partID=82692&src-supplier=Verical; ComponentLink4URL: https://www.diodes.com/assets/Datasheets/ds30041.pdf?src-supplier=Digi-Key; ComponentLink4Description: https://www.diodes.com/assets/Datasheets/ds30041.pdf?src-supplier=Digi-Key; ComponentLink5URL: http://www.diodes.com/datasheets/ds30041.pdf?src-supplier=Avnet+Europe; ComponentLink5Description: http://www.diodes.com/datasheets/ds30041.pdf?src-supplier=Avnet+Europe; ComponentLink6URL: http://www.diodes.com/datasheets/ds30041.pdf?src-supplier=Element14; ComponentLink6Description: http://www.diodes.com/datasheets/ds30041.pdf?src-supplier=Element14; Supplier Part Number 1: MMBT2222A-FDIDKR-ND; LCSC Part Number: C94515
footprint SOT-23
pins: 1 B, 2 E, 3 C

## MMBT2222ATT3G
designator Q?
Small Signal Bipolar Transistor, 0.6A I(C), 40V V(BR)CEO, 1-Element, NPN, Silicon; Manufacturer: ON Semiconductor; Manufacturer Part Number: MMBT2222ATT3G; Supplier: Digikey; Supplier Part Number: MMBT2222ATT3GOSCT-ND; RoHS: Yes; Category: BJTs; Stock: 7029; Pricing: 1=0.12, 10=0.082, 100=0.0441, 500=0.03466, 1000=0.02407, 2000=0.01994, 5000=0.01885 (USD); ComponentLink1URL: https://datasheet.ciiva.com/980/mmbt2222lt1-d-980718.pdf?src-supplier=Digikey; ComponentLink1Description: https://datasheet.ciiva.com/980/mmbt2222lt1-d-980718.pdf?src-supplier=Digikey; ComponentLink2URL: https://datasheet.ciiva.com/4724/mmbt2222att1-d-81771-4724629.pdf?src-supplier=Mouser; ComponentLink2Description: https://datasheet.ciiva.com/4724/mmbt2222att1-d-81771-4724629.pdf?src-supplier=Mouser
footprint MMBT2222ATT3G
pins: 1 B, 2 E, 3 C

## MMBT2907AQ-7-F
designator Q?
GENERAL PURPOSE TRANSISTOR SOT23; Manufacturer: Diodes; Manufacturer Part Number: MMBT2907AQ-7-F; Item Type: BJTs; Supplier: Digikey; LCSC Part Number: C526673; RoHS: Yes; Stock: 8233; Pricing: 1=0.12, 10=0.083, 100=0.0554, 500=0.04206, 1000=0.03752 (USD); ComponentLink1URL: http://components.arrow.com/part/dataview/57135560S594856N2867?src-supplier=Arrow+Electronics; ComponentLink1Description: http://components.arrow.com/part/dataview/57135560S594856N2867?src-supplier=Arrow+Electronics; ComponentLink2URL: http://www.diodes.com/datasheets/ds30040.pdf?src-supplier=Future+Electronics; ComponentLink2Description: http://www.diodes.com/datasheets/ds30040.pdf?src-supplier=Future+Electronics; ComponentLink3URL: https://datasheet.octopart.com/MMBT2907AQ-7-F-Diodes-Inc.-datasheet-41192549.pdf?src-supplier=Future+Electronics; ComponentLink3Description: https://datasheet.octopart.com/MMBT2907AQ-7-F-Diodes-Inc.-datasheet-41192549.pdf?src-supplier=Future+Electronics
footprint SOT-23 (TRANS NPN 40V 0.6A SOT23)
pins: 1 B, 2 E, 3 C

## MMBT3904
designator Q?
40V 200mW 100 200mA NPN SOT-23 Bipolar (BJT) ROHS; Manufacturer: ElecSuper; Manufacturer Part Number: MMBT3904; Item Type: (BJT); Package: SOT-23; LCSC Part Number: C5249683; ComponentLink1Description: LCSC; ComponentLink1URL: https://www.lcsc.com/product-detail/Bipolar-BJT_ElecSuper-MMBT3904_C5249683.html
footprint SOT-23 (TRANS NPN 40V 0.6A SOT23)
pins: 1 E, 2 B, 3 C

## MMBT3904-TP
designator Q?
TRANS NPN 40V 0.2A SOT23; Manufacturer: MCC; Manufacturer Part Number: MMBT3904-TP; Item Type: BJTs; Max Power Dissipation: 350mW; Number of Elements: 1; hFE Min: 40; Frequency: 300MHz; Max Collector Current: 200mA; Collector Base Voltage (VCBO): 60V; Emitter Base Voltage (VEBO): 6V; Collector Emitter Saturation Voltage: 300mV; Current Rating: 100mA; Supplier: Digikey; Supplier Part Number: MMBT3904TPMSCT-ND; RoHS: Yes; Stock: 2179653; Pricing: 1=0.1, 10=0.068, 100=0.0369, 500=0.02898, 1000=0.02012 (USD); Mounting Technology: Surface Mount; Case/Package: SOT-23; Pins: 3; Min Operating Temperature: -55°C; Max Operating Temperature: 150°C; Package Quantity: 1; Collector Emitter Voltage (VCEO): 40V; Packaging: Tape and Reel; Transition Frequency: 300MHz; Collector Emitter Breakdown Voltage: 40V; Polarity: NPN; Max Breakdown Voltage: 40V; Power Dissipation: 350mW; Clock Frequency: 300MHz; Gain Bandwidth Product: 300MHz; Series: -; Collector-emitter Voltage-Max: 300mV; Voltage Rating (DC): 40V; Length: 3.04mm; Width: 1.4mm; Height: 1.12mm; Radiation Hardening: No; RoHS Compliant: Yes; Lead Free: 5697LeadFree; ComponentLink1URL: https://datasheet.ciiva.com/16291/mmbt3904sot-23-37005-16291911.pdf?src-supplier=Mouser; ComponentLink1Description: https://datasheet.ciiva.com/16291/mmbt3904sot-23-37005-16291911.pdf?src-supplier=Mouser; ComponentLink2URL: https://datasheet.ciiva.com/15139/getdatasheetpartid-251950-15139820.pdf?src-supplier=Verical; ComponentLink2Description: https://datasheet.ciiva.com/15139/getdatasheetpartid-251950-15139820.pdf?src-supplier=Verical; ComponentLink3URL: https://datasheet.ciiva.com/972/mmbt3904sot-23-972515.pdf?src-supplier=Digikey; ComponentLink3Description: https://datasheet.ciiva.com/972/mmbt3904sot-23-972515.pdf?src-supplier=Digikey; ComponentLink4URL: https://datasheet.ciiva.com/14546/70055699-14546053.pdf?src-supplier=Allied+Electronics; ComponentLink4Description: https://datasheet.ciiva.com/14546/70055699-14546053.pdf?src-supplier=Allied+Electronics; ComponentLink5URL: https://datasheet.ciiva.com/16742/mmbt3904tsot-523-16742101.pdf?src-supplier=Future+Electronics; ComponentLink5Description: https://datasheet.ciiva.com/16742/mmbt3904tsot-523-16742101.pdf?src-supplier=Future+Electronics; ComponentLink6URL: https://datasheet.ciiva.com/972/mmbt3904sot-23-972516.pdf?src-supplier=Digikey; ComponentLink6Description: https://datasheet.ciiva.com/972/mmbt3904sot-23-972516.pdf?src-supplier=Digikey
footprint SOT-23 (TRANS NPN 40V 0.6A SOT23)
pins: 1 B, 2 E, 3 C

## MMBT3904M
designator Q?
40V 100mW 100@10mA,1V 200mA 300MHz 300mV@50mA,5mA NPN -55℃~+150℃@(Tj) SOT-723 Bipolar Transistors - BJT ROHS; Manufacturer: TECH PUBLIC; Manufacturer Part Number: MMBT3904M; Item Type: Mosfet; ComponentLink1Description: LCSC; ComponentLink1URL: https://www.lcsc.com/product-detail/Bipolar-Transistors-BJT_TECH-PUBLIC-MMBT3904M_C2923360.html; Package: SOT-723; LCSC Part Number: C2923360
footprint SOT-723
pins: 1 B, 2 E, 3 C

## MMBT3904T-7-F
designator Q?
TRANS NPN 40V 0.2A SOT523; Manufacturer: Diodes Zetex; Manufacturer Part Number: MMBT3904T-7-F; Item Type: Transistor; Supplier: Future Electronics; Supplier Part Number: 4140292; RoHS: Yes; Category: BJTs; Stock: 36000; Pricing: 3000=0.0261, 9000=0.0252, 15000=0.0248, 60000=0.0236, 90000=0.0229 (USD); ComponentLink1URL: https://datasheet.ciiva.com/15139/getdatasheetpartid-142850-15139485.pdf?src-supplier=Verical; ComponentLink1Description: https://datasheet.ciiva.com/15139/getdatasheetpartid-142850-15139485.pdf?src-supplier=Verical; ComponentLink2URL: https://datasheet.ciiva.com/11199/ds30270-11199009.pdf?src-supplier=Avnet; ComponentLink2Description: https://datasheet.ciiva.com/11199/ds30270-11199009.pdf?src-supplier=Avnet; ComponentLink3URL: https://datasheet.ciiva.com/17053/0900766b80e49818-17053736.pdf?src-supplier=Allied+Electronics; ComponentLink3Description: https://datasheet.ciiva.com/17053/0900766b80e49818-17053736.pdf?src-supplier=Allied+Electronics; ComponentLink4URL: https://datasheet.ciiva.com/8029/ds30270-8029717.pdf?src-supplier=Element14; ComponentLink4Description: https://datasheet.ciiva.com/8029/ds30270-8029717.pdf?src-supplier=Element14; ComponentLink5URL: https://datasheet.ciiva.com/22711/480146-22711751.pdf?src-supplier=Element14; ComponentLink5Description: https://datasheet.ciiva.com/22711/480146-22711751.pdf?src-supplier=Element14; ComponentLink6URL: https://datasheet.ciiva.com/4723/ds30270-4723401.pdf?src-supplier=Mouser; ComponentLink6Description: https://datasheet.ciiva.com/4723/ds30270-4723401.pdf?src-supplier=Mouser; ComponentLink7URL: https://datasheet.ciiva.com/6360/ds30270-6360919.pdf?src-supplier=Digikey; ComponentLink7Description: https://datasheet.ciiva.com/6360/ds30270-6360919.pdf?src-supplier=Digikey; LCSC Part Number: C239187
footprint SOT-523
pins: 1 B, 2 E, 3 C

## MMBT3906
designator Q?
40V 300mW 200mA PNP SOT-23(TO-236) Bipolar Transistors - BJT ROHS; Manufacturer: YONGYUTAI; Manufacturer Part Number: MMBT3906; Package: SOT-23(TO-236); LCSC Part Number: C2891809; ComponentLink1Description: LCSC; ComponentLink1URL: https://www.lcsc.com/product-detail/Bipolar-Transistors-BJT_YONGYUTAI-MMBT3906_C2891809.html; Item Type: Transistor
footprint SOT-23 (TRANS NPN 40V 0.6A SOT23)
pins: 1 B, 2 E, 3 C

## MMBT3906-7-F
designator Q?
TRANS PNP 40V 0.2A SOT23-3; Manufacturer: Diodes Zetex; Manufacturer Part Number: MMBT3906-7-F; Item Type: BJTs; Voltage Rating (DC): -40V; Current Rating: -200mA; Supplier: Future Electronics; LCSC Part Number: C82762; RoHS: Yes; Stock: 567000; Pricing: 3000=0.0143, 12000=0.0137, 30000=0.0112, 45000=0.0131, 75000=0.0109, 120000=0.0128, 300000=0.0121 (USD); Lead Free: 5697LeadFree; ComponentLink1URL: https://datasheet.ciiva.com/27052/1540746-27052408.pdf?src-supplier=Jameco; ComponentLink1Description: https://datasheet.ciiva.com/27052/1540746-27052408.pdf?src-supplier=Jameco; ComponentLink2URL: https://datasheet.ciiva.com/15139/getdatasheetpartid-255292-15139821.pdf?src-supplier=Verical; ComponentLink2Description: https://datasheet.ciiva.com/15139/getdatasheetpartid-255292-15139821.pdf?src-supplier=Verical
footprint SOT-23 (TRANS NPN 40V 0.6A SOT23)
pins: 1 B, 2 E, 3 C

## MMBT4401-7-F
designator Q?
TRANS NPN 40V 0.6A SOT23-3; Manufacturer: Diodes; Manufacturer Part Number: MMBT4401-7-F; Item Type: BJTs; Supplier: Future Electronics; LCSC Part Number: C151826; RoHS: Yes; Stock: 1359000; Pricing: 3000=0.0119, 12000=0.0113, 30000=0.011, 75000=0.0107, 120000=0.0102 (USD); ComponentLink1URL: https://datasheet.ciiva.com/15139/getdatasheetpartid-91436-15139165.pdf?src-supplier=Verical; ComponentLink1Description: https://datasheet.ciiva.com/15139/getdatasheetpartid-91436-15139165.pdf?src-supplier=Verical; ComponentLink2URL: https://datasheet.ciiva.com/972/ds30039-972547.pdf?src-supplier=Digikey; ComponentLink2Description: https://datasheet.ciiva.com/972/ds30039-972547.pdf?src-supplier=Digikey; ComponentLink3URL: https://datasheet.ciiva.com/972/ds30039-972548.pdf?src-supplier=Digikey; ComponentLink3Description: https://datasheet.ciiva.com/972/ds30039-972548.pdf?src-supplier=Digikey; ComponentLink4URL: https://datasheet.ciiva.com/972/ds30039-972549.pdf?src-supplier=Digikey; ComponentLink4Description: https://datasheet.ciiva.com/972/ds30039-972549.pdf?src-supplier=Digikey; ComponentLink5URL: https://datasheet.ciiva.com/11201/ds30039-11201820.pdf?src-supplier=Avnet; ComponentLink5Description: https://datasheet.ciiva.com/11201/ds30039-11201820.pdf?src-supplier=Avnet; ComponentLink6URL: https://datasheet.ciiva.com/16199/ds30039-16199054.pdf?src-supplier=Future+Electronics; ComponentLink6Description: https://datasheet.ciiva.com/16199/ds30039-16199054.pdf?src-supplier=Future+Electronics
footprint SOT-23 (TRANS NPN 40V 0.6A SOT23)
pins: 1 B, 2 E, 3 C

## MMBT4403LT1G
designator Q?
TRANS PNP 40V 600MA SOT23-3; Manufacturer: ON Semiconductor; Manufacturer Part Number: MMBT4403LT1G; Max Power Dissipation: 300mW; hFE Min: 30; Emitter Base Voltage (VEBO): 5V; Transition Frequency: 200MHz; Collector Emitter Saturation Voltage: -750mV; Element Configuration: Single; Voltage Rating (DC): -40V; Current Rating: -600mA; Collector-emitter Voltage-Max: 750mV; Number of Elements: 1; ComponentLink1URL: http://www.onsemi.com/pub/Collateral/MMBT4403LT1-D.PDF?src-supplier=Avnet; ComponentLink1Description: http://www.onsemi.com/pub/Collateral/MMBT4403LT1-D.PDF?src-supplier=Avnet; ComponentLink2URL: http://www.onsemi.com/pub/Collateral/MMBT4403LT1-D.PDF?src-supplier=Digi-Key; ComponentLink2Description: http://www.onsemi.com/pub/Collateral/MMBT4403LT1-D.PDF?src-supplier=Digi-Key; Supplier 1: Avnet; RoHS: Yes; Category: BJTs; Stock 1: 25249; Pricing 1: 1=0.14200, 10=0.09900, 100=0.05400, 500=0.04300 (USD); Case/Package: SOT-23-3; Number of Pins: 3; Contact Plating: Tin,Matte; Min Operating Temperature: -55°C; Max Operating Temperature: 150°C; Packaging: Tape and Reel; Polarity: PNP; Collector Emitter Breakdown Voltage: 40V; Package Quantity: 1; Collector Emitter Voltage (VCEO): 40V; Max Collector Current: 600mA; Collector Base Voltage (VCBO): 40V; Power Dissipation: 300mW; Gain Bandwidth Product: 200MHz; Max Frequency: 200MHz; Series: -; Frequency: 200MHz; Max Breakdown Voltage: 40V; Length: 3.04mm; Width: 1.4mm; Height: 1.01mm; Radiation Hardening: No; Lead Free: Lead Free; REACH SVHC: No SVHC; RoHS Compliant: Yes; ComponentLink3URL: https://datasheet.ciiva.com/4722/mmbt4403lt1-d-101652-4722132.pdf?src-supplier=Mouser; ComponentLink3Description: https://datasheet.ciiva.com/4722/mmbt4403lt1-d-101652-4722132.pdf?src-supplier=Mouser; ComponentLink4URL: https://datasheet.ciiva.com/15138/getdatasheetpartid-44367-15138750.pdf?src-supplier=Verical; ComponentLink4Description: https://datasheet.ciiva.com/15138/getdatasheetpartid-44367-15138750.pdf?src-supplier=Verical; ComponentLink5URL: https://datasheet.ciiva.com/14546/70099534-14546501.pdf?src-supplier=Allied+Electronics; ComponentLink5Description: https://datasheet.ciiva.com/14546/70099534-14546501.pdf?src-supplier=Allied+Electronics; ComponentLink6URL: https://datasheet.ciiva.com/7972/mmbt4403lt1-d-7972391.pdf?src-supplier=Element14; ComponentLink6Description: https://datasheet.ciiva.com/7972/mmbt4403lt1-d-7972391.pdf?src-supplier=Element14; ComponentLink7URL: https://datasheet.ciiva.com/11198/mmbt4403lt1-d-11198713.pdf?src-supplier=Avnet; ComponentLink7Description: https://datasheet.ciiva.com/11198/mmbt4403lt1-d-11198713.pdf?src-supplier=Avnet; ComponentLink8URL: https://datasheet.ciiva.com/16478/mmbt4403lt1-d-16478554.pdf?src-supplier=Avnet+Asia; ComponentLink8Description: https://datasheet.ciiva.com/16478/mmbt4403lt1-d-16478554.pdf?src-supplier=Avnet+Asia; ComponentLink9URL: https://datasheet.ciiva.com/976/mmbt4403lt1-d-976347.pdf?src-supplier=Digi-Key; ComponentLink9Description: https://datasheet.ciiva.com/976/mmbt4403lt1-d-976347.pdf?src-supplier=Digi-Key; ComponentLink10URL: https://datasheet.ciiva.com/16396/mmbt4403lt1-d-16396635.pdf?src-supplier=Future+Electronics; ComponentLink10Description: https://datasheet.ciiva.com/16396/mmbt4403lt1-d-16396635.pdf?src-supplier=Future+Electronics; ComponentLink11URL: https://datasheet.ciiva.com/976/mmbt4403lt1-d-976348.pdf?src-supplier=Digi-Key; ComponentLink11Description: https://datasheet.ciiva.com/976/mmbt4403lt1-d-976348.pdf?src-supplier=Digi-Key; ComponentLink12URL: https://datasheet.ciiva.com/976/mmbt4403lt1-d-976349.pdf?src-supplier=Digi-Key; ComponentLink12Description: https://datasheet.ciiva.com/976/mmbt4403lt1-d-976349.pdf?src-supplier=Digi-Key; ComponentLink13URL: https://datasheet.ciiva.com/25998/mmbt4403lt1-d-25998110.pdf?src-supplier=Avnet+Europe; ComponentLink13Description: https://datasheet.ciiva.com/25998/mmbt4403lt1-d-25998110.pdf?src-supplier=Avnet+Europe; Supplier Part Number 1: 88H4792; LCSC Part Number: C78864
footprint sot-23
pins: 1 B, 2 E, 3 C

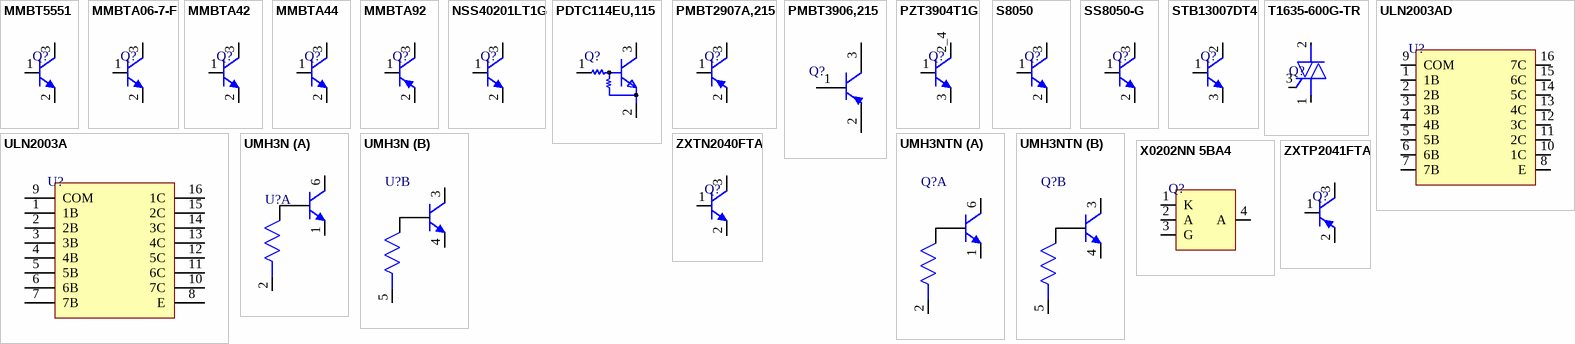
[diagram p1: symbols MMBT5551 to ZXTP2041FTA]